# Altium footprint library Amin-Library.PcbLib: 601 footprints (part 13 of 38)
Each footprint in its own frame and in the unit in brackets; x right, y up, seen from the top. Pads: shape width x height; smd on the part's side, far side on the other; paste and mask are expansions set on the pad; w line width, h text height; cw(c..) or ccw(c..) is an arc to the next point about the centre after c.
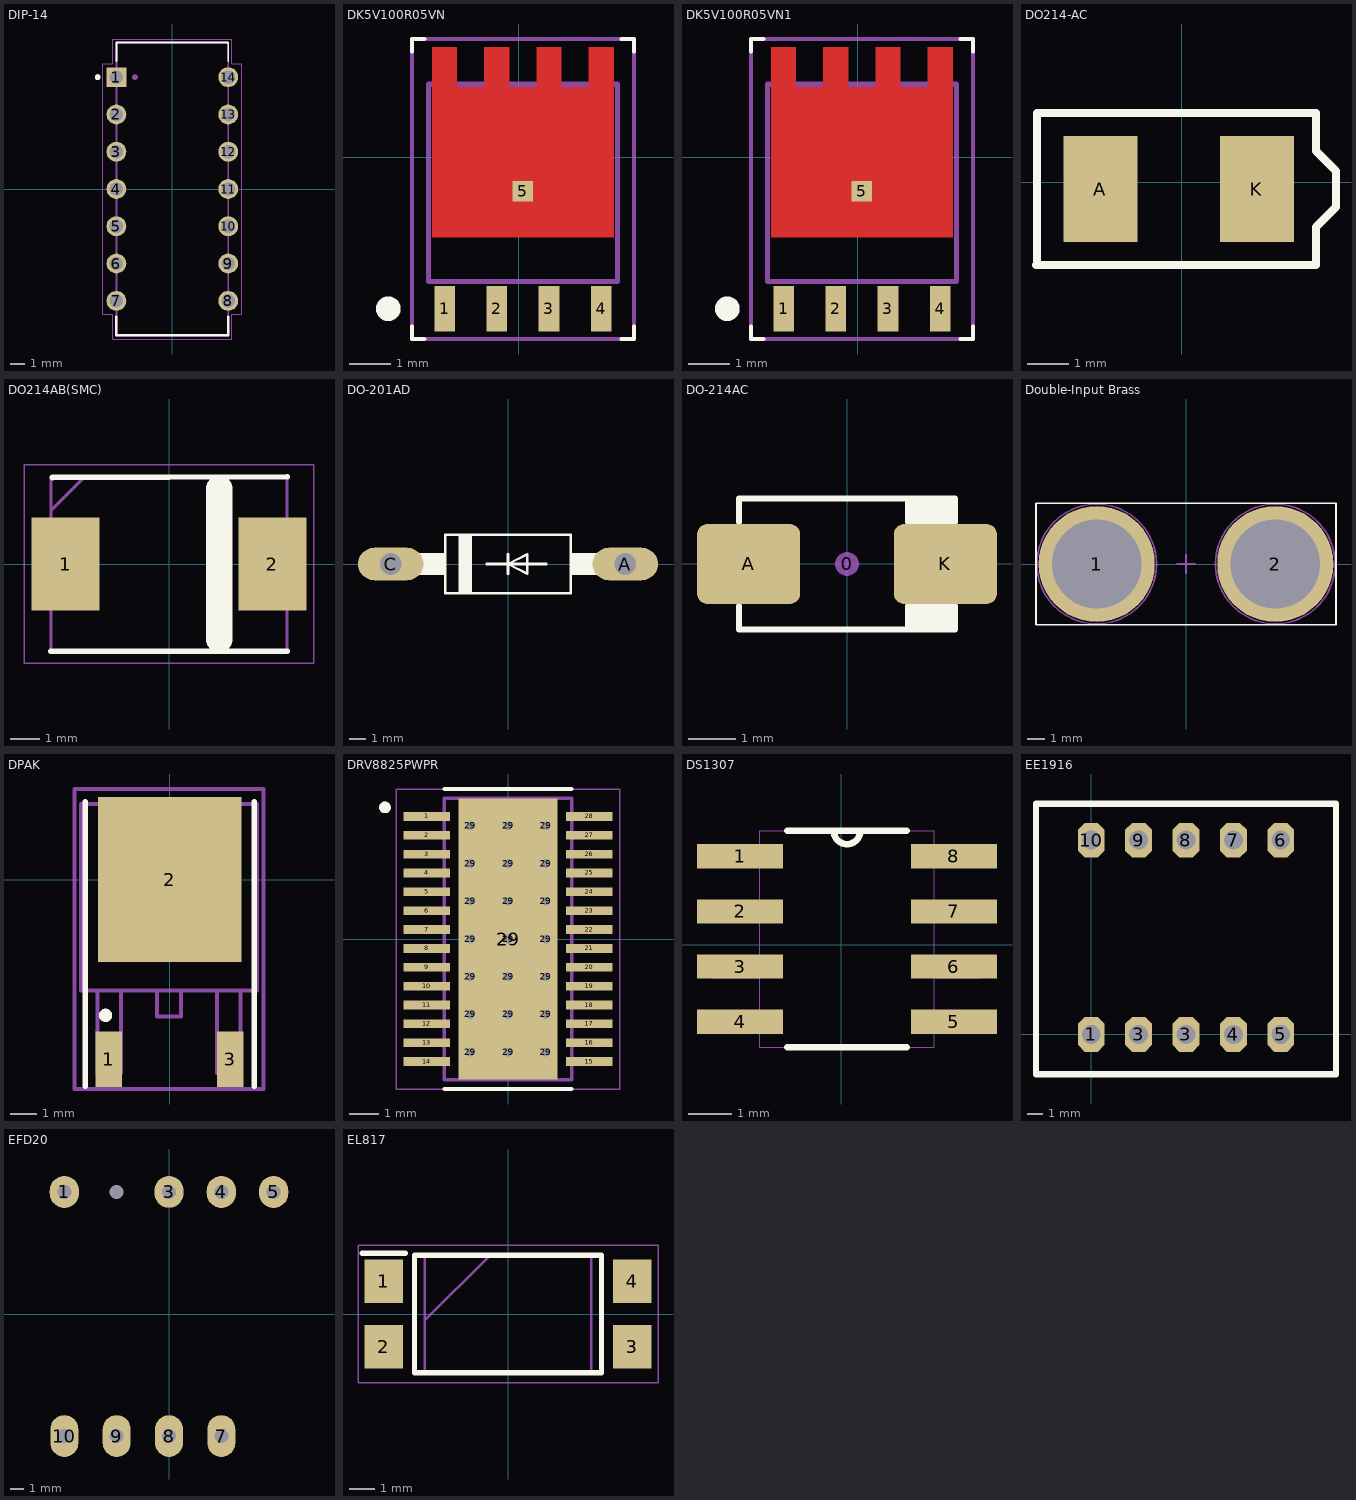
[diagram p12: the footprints below, top view; thin cyan lines are the x and y axes]

## DIP-14 [mm]
pads (14):
  rect 1.35x1.35 hole 0.9: 1(-3.81,7.62)
  round 1.35 hole 0.9: 2(-3.81,5.08) 3(-3.81,2.54) 4(-3.81,0) 5(-3.81,-2.54) 6(-3.81,-5.08) 7(-3.81,-7.62) 8(3.81,-7.62) 9(3.81,-5.08) 10(3.81,-2.54) 11(3.81,0) 12(3.81,2.54) 13(3.81,5.08) 14(3.81,7.62)
Top Overlay:
  circle w0.2: c-5.08,7.62 r0.1
  lines w0.127: -3.81,8.7 -3.81,9.97 3.81,9.97 3.81,8.7
  lines w0.152: -3.81,-8.7 -3.81,-9.97 3.81,-9.97 3.81,-8.7
Mechanical 13:
  circle w0.2: c-2.54,7.62 r0.1
  lines w0.127: -3.81,-9.97 -3.81,9.97 3.81,9.97 3.81,-9.97 -3.81,-9.97
Mechanical 15:
  lines w0.05: -4.735,-8.545 -4.735,8.545 -4.06,8.545 -4.06,10.22 4.06,10.22 4.06,8.545 4.735,8.545 4.735,-8.545 4.06,-8.545 4.06,-10.22 -4.06,-10.22 -4.06,-8.545 -4.735,-8.545
3D body "DIP-14.STEP": height 5.08, standoff -3.3, extent -4.064,-9.652 4.13,9.652

## DK5V100R05VN [mm] "DFN5*6"
height 22
pads (5):
  rect 0.5x1.1 smd paste-1: 1(-1.805,-3.688) 2(-0.535,-3.688) 3(0.735,-3.688) 4(2.005,-3.688)
  rect 0.5x0.5 smd paste-1 mask+0: 5(0.1,-0.825)
Top Layer:
  region: -1.505,2.675 -1.505,1.7 -0.835,1.7 -0.835,2.675 -0.235,2.675 -0.235,1.7 0.435,1.7 0.435,2.675 1.035,2.675 1.035,1.7 1.705,1.7 1.705,2.675 2.305,2.675 2.305,-1.955 -2.105,-1.955 -2.105,2.675
Top Overlay:
  circle w0.3: c-3.175,-3.688 r0.15
  lines w0.1: -2.6,-4.125 -2.6,-4.425 -2.3,-4.425 ; -2.6,2.575 -2.6,2.875 -2.3,2.875 ; 2.5,-4.425 2.8,-4.425 2.8,-4.125 ; 2.5,2.875 2.8,2.875 2.8,2.575
Top Paste:
  region: -0.335,-3.276 -0.335,-4.1 -0.735,-4.1 -0.735,-3.276
  region: -1.605,-3.276 -1.605,-4.1 -2.005,-4.1 -2.005,-3.276
  region: 0.935,-3.276 0.935,-4.1 0.535,-4.1 0.535,-3.276
  region: 2.205,-3.276 2.205,-4.1 1.805,-4.1 1.805,-3.276
  region: -0.285,2.45 -0.285,1.7 -0.785,1.7 -0.785,2.45
  region: -1.555,2.45 -1.555,1.7 -2.055,1.7 -2.055,2.45
  region: 0.985,2.45 0.985,1.7 0.485,1.7 0.485,2.45
  region: 2.255,2.45 2.255,1.7 1.755,1.7 1.755,2.45
  region: 0,-0.2 0,-1.7 -1.5,-1.7 -1.5,-0.2
  region: 0,1.5 0,0 -1.5,0 -1.5,1.5
  region: 1.7,-0.2 1.7,-1.7 0.2,-1.7 0.2,-0.2
  region: 1.7,1.5 1.7,0 0.2,0 0.2,1.5
Top Solder:
  region: -1.405,2.775 -1.405,1.8 -0.935,1.8 -0.935,2.775 -0.135,2.775 -0.135,1.8 0.335,1.8 0.335,2.775 1.135,2.775 1.135,1.8 1.605,1.8 1.605,2.775 2.405,2.775 2.405,-2.055 -2.205,-2.055 -2.205,2.775
Mechanical 13:
  lines w0.127: -2.2,-3.025 2.4,-3.025 2.4,1.775 -2.2,1.775 -2.2,-3.025
Mechanical 15:
  lines w0.1: -0.4,-0.825 0.6,-0.825 ; 0.1,-1.325 0.1,-0.325 ; -2.6,-4.425 -2.6,2.875 2.8,2.875 2.8,2.475 2.8,-4.425 2.4,-4.425 -2.6,-4.425
3D body "BSC0901NSI.STEP": height 1.1, standoff 0, extent -2.475,-3.9 2.675,2.25

## DK5V100R05VN1 [mm] "DFN5*6"
height 22
pads (5):
  rect 0.5x1.1 smd paste-1: 1(-1.805,-3.688) 2(-0.535,-3.688) 3(0.735,-3.688) 4(2.005,-3.688)
  rect 0.5x0.5 smd paste-1 mask+0: 5(0.1,-0.825)
Top Layer:
  region: -1.505,2.675 -1.505,1.7 -0.835,1.7 -0.835,2.675 -0.235,2.675 -0.235,1.7 0.435,1.7 0.435,2.675 1.035,2.675 1.035,1.7 1.705,1.7 1.705,2.675 2.305,2.675 2.305,-1.955 -2.105,-1.955 -2.105,2.675
Top Overlay:
  circle w0.3: c-3.175,-3.688 r0.15
  lines w0.1: -2.6,-4.125 -2.6,-4.425 -2.3,-4.425 ; -2.6,2.575 -2.6,2.875 -2.3,2.875 ; 2.5,-4.425 2.8,-4.425 2.8,-4.125 ; 2.5,2.875 2.8,2.875 2.8,2.575
Top Paste:
  region: -0.335,-3.276 -0.335,-4.1 -0.735,-4.1 -0.735,-3.276
  region: -1.605,-3.276 -1.605,-4.1 -2.005,-4.1 -2.005,-3.276
  region: 0.935,-3.276 0.935,-4.1 0.535,-4.1 0.535,-3.276
  region: 2.205,-3.276 2.205,-4.1 1.805,-4.1 1.805,-3.276
  region: -0.285,2.45 -0.285,1.7 -0.785,1.7 -0.785,2.45
  region: -1.555,2.45 -1.555,1.7 -2.055,1.7 -2.055,2.45
  region: 0.985,2.45 0.985,1.7 0.485,1.7 0.485,2.45
  region: 2.255,2.45 2.255,1.7 1.755,1.7 1.755,2.45
  region: 0,-0.2 0,-1.7 -1.5,-1.7 -1.5,-0.2
  region: 0,1.5 0,0 -1.5,0 -1.5,1.5
  region: 1.7,-0.2 1.7,-1.7 0.2,-1.7 0.2,-0.2
  region: 1.7,1.5 1.7,0 0.2,0 0.2,1.5
Top Solder:
  region: -1.405,2.775 -1.405,1.8 -0.935,1.8 -0.935,2.775 -0.135,2.775 -0.135,1.8 0.335,1.8 0.335,2.775 1.135,2.775 1.135,1.8 1.605,1.8 1.605,2.775 2.405,2.775 2.405,-2.055 -2.205,-2.055 -2.205,2.775
Mechanical 13:
  lines w0.127: -2.2,-3.025 2.4,-3.025 2.4,1.775 -2.2,1.775 -2.2,-3.025
Mechanical 15:
  lines w0.1: -0.4,-0.825 0.6,-0.825 ; 0.1,-1.325 0.1,-0.325 ; -2.6,-4.425 -2.6,2.875 2.8,2.875 2.8,2.475 2.8,-4.425 2.4,-4.425 -2.6,-4.425
3D body "BSC0901NSI.STEP": height 1.1, standoff 0, extent -2.475,-3.9 2.675,2.25

## DO214-AC [mm]
pads (2):
  rect 1.78x2.54 smd: A(-1.956,-0.165) K(1.804,-0.165)
Top Overlay:
  lines w0.2: -3.505,-1.994 3.226,-1.994 3.226,-1.079 3.709,-0.597 3.709,0.267 3.226,0.749 3.226,1.664 -3.48,1.664 -3.48,-1.994

## DO214AB(SMC) [mm]
pads (2):
  rect 2.3x3.15 smd: 1(-3.5,0) 2(3.5,0)
Top Overlay:
  lines w0.2: -4,-2.952 4,-2.952 ; -3.937,2.921 4,2.952
  lines w0.9: 1.7,-2.54 1.7,2.54
Mechanical 15:
  lines w0.1: -4,1.802 -2.85,2.952 ; -4,-2.952 -4,2.952 4,2.952 4,-2.952 -4,-2.952
Mechanical 20:
  lines w0.05: -4.9,-3.36 -4.9,3.36 4.9,3.36 4.9,-3.36 -4.9,-3.36
3D body "DO214AB(SMC).stp": height 2.9, standoff 0, extent -4,-2.953 4,2.952

## DO-201AD [mm]
pads (2):
  oval 3.9x1.95 hole 1.3: A(6.985,0) C(-6.985,0)
Top Overlay:
  region: 3.75,0.635 6,0.635 6,-0.635 3.75,-0.635
  region: -6,0.635 -3.75,0.635 -3.75,-0.635 -6,-0.635
  region: -2.921,1.75 -2.159,1.75 -2.159,-1.75 -2.921,-1.75
  lines w0.152: -1.27,0 0,0 ; 0,-0.584 0,0 ; 0,0.584 0,0 ; 2.286,0 0,0 ; 0,0 1.143,-0.584 1.143,0.584 0,0 ; -3.75,-1.75 3.75,-1.75 3.75,1.75 -3.75,1.75 -3.75,-1.75
3D body "DO-201AD.stp": height 5.65, standoff -3.66, extent -7.73,-2.65 7.73,2.65

## DO-214AC [mm] "JEDEC DO214 variation AC. SMA"
height 2.5
pads (3):
  round 0.508 on Mech15: 0(0,0)
  rrect25% 2.2x1.7 smd: A(-2.1,0) K(2.1,0)
Top Overlay:
  rectangle: 1.3,0.9 2.3,1.4
  rectangle: 1.3,-1.4 2.3,-0.9
  lines w0.127: -2.3,-0.9 -2.3,-1.4 2.3,-1.4 2.3,-0.9 1.3,-0.9 1.3,-1.4 ; -2.3,0.9 -2.3,1.4 2.3,1.4 2.3,0.9 1.3,0.9 ; 1.3,0.911 1.3,1.4
3D body "SW3dPS-DO-214AC SMA.STEP": height 2.42, standoff 0.02, extent -2.6,-1.3 2.6,1.3

## Double-Input Brass [mm]
height 10.5
pads (2):
  round 6.5 hole 5: 1(-5,0) 2(5,0)
Top Overlay:
  lines w0.1: -8.4,-3.4 8.4,-3.4 8.4,3.4 -8.4,3.4 -8.4,-3.4
Mechanical 1:
  circle w0.1: c5,0 r3.35
  circle w0.1: c-5,0 r3.35
Mechanical 15:
  lines w0.1: -0.5,0 0.5,0 ; 0,-0.5 0,0.5
3D body: height 9, standoff -1, extent -7.54,-2.54 -2.46,2.54
3D body: height 9, standoff -1, extent 2.46,-2.54 7.54,2.54

## DPAK [mm]
height 9.45
pads (3):
  rect 1x2.1 smd: 1(-2.285,-6.75) 3(2.285,-6.75)
  rect 5.4x6.2 smd paste-3: 2(0,0)
Top Overlay:
  circle w0.25: c-2.41,-5.099 r0.125
  lines w0.2: -3.174,-7.766 -3.174,2.934 ; 3.176,-7.766 3.176,2.934
Top Paste:
  rectangle: 0.5,0.5 2.5,3
  rectangle: -2.5,0.5 -0.5,3
  rectangle: 0.5,-3 2.5,-0.5
  rectangle: -2.5,-3 -0.5,-0.5
Mechanical 4:
  lines w0.152: -3.326,-4.159 -3.326,2.851 ; -3.326,-4.159 3.278,-4.159 ; -3.326,-4.159 -3.326,2.851 ; -3.326,-4.159 3.278,-4.159 ; -3.326,2.851 3.278,2.851 ; -3.326,2.851 3.278,2.851 ; -2.717,-7.258 -1.828,-7.258 ; -2.717,-7.258 -2.717,-4.159 ; -2.717,-7.258 -1.828,-7.258 ; -2.717,-7.258 -2.717,-4.159 ; -2.717,-4.159 -1.828,-4.159 ; -2.717,-4.159 -1.828,-4.159 ; -1.828,-7.258 -1.828,-4.159 ; -1.828,-7.258 -1.828,-4.159 ; -0.482,-5.15 0.433,-5.15 ; -0.482,-5.15 -0.482,-4.159 -0.482,-5.15 ; -0.482,-5.15 0.433,-5.15 ; 0.433,-5.15 0.433,-4.159 0.433,-5.15 ; 1.779,-7.258 2.668,-7.258 ; 1.779,-7.258 1.779,-4.159 ; 1.779,-7.258 2.668,-7.258 ; 1.779,-7.258 1.779,-4.159 ; 1.779,-4.159 2.668,-4.159 ; 1.779,-4.159 2.668,-4.159 ; 2.668,-7.258 2.668,-4.159 ; 2.668,-7.258 2.668,-4.159 ; 3.278,-4.159 3.278,2.851 ; 3.278,-4.159 3.278,2.851
Mechanical 16:
  lines w0.152: -3.58,-7.868 -3.58,3.41 3.532,3.41 3.532,-7.868 -3.58,-7.868
3D body "User Library-Generic DPAK 3 lead.step": height 2.4, standoff 0, extent -3.391,-6.854 3.343,3.246

## Drop_Bottom [mm]
3D body "down 5.SLDPRT": height 21.01, standoff 6.01, extent -95.206,-97.761 114.764,162.239

## Drop_Top [mm]
3D body "28.SLDPRT": height 36.51, standoff 0.01, extent 17.272,-2.746 227.272,257.254

## DRV8825PWPR [mm] "HTSSOP-28"
pads (50):
  rect 1.6x0.3 smd paste-2 mask+0: 1(-2.8,4.225) 2(-2.8,3.575) 3(-2.8,2.925) 4(-2.8,2.275) 5(-2.8,1.625) 6(-2.8,0.975) 7(-2.8,0.325) 8(-2.8,-0.325) 9(-2.8,-0.975) 10(-2.8,-1.625) 11(-2.8,-2.275) 12(-2.8,-2.925) 13(-2.8,-3.575) 14(-2.8,-4.225) 15(2.8,-4.225) 16(2.8,-3.575) 17(2.8,-2.925) 18(2.8,-2.275) 19(2.8,-1.625) 20(2.8,-0.975) 21(2.8,-0.325) 22(2.8,0.325) 23(2.8,0.975) 24(2.8,1.625) 25(2.8,2.275) 26(2.8,2.925) 27(2.8,3.575) 28(2.8,4.225)
  round 0.5 hole 0.3 mask+0: 29(-1.3,-3.9) 29(-1.3,-2.6) 29(-1.3,-1.3) 29(-1.3,0) 29(-1.3,1.3) 29(-1.3,2.6) 29(-1.3,3.9) 29(0,-3.9) 29(0,-2.6) 29(0,-1.3) 29(0,0) 29(0,1.3) 29(0,2.6) 29(0,3.9) 29(1.3,-3.9) 29(1.3,-2.6) 29(1.3,-1.3) 29(1.3,0) 29(1.3,1.3) 29(1.3,2.6) 29(1.3,3.9)
  rect 3.4x9.7 smd paste-6 mask+0: 29(0,0)
Top Overlay:
  circle w0.2: c-4.24,4.535 r0.1
  lines w0.127: -2.2,-5.17 2.2,-5.17 ; -2.2,5.17 2.2,5.17
Top Paste:
  region: 3.575,-4.35 2.025,-4.35 2.025,-4.1 3.575,-4.1
  region: 3.575,-3.7 2.025,-3.7 2.025,-3.45 3.575,-3.45
  region: 3.575,-3.05 2.025,-3.05 2.025,-2.8 3.575,-2.8
  region: 3.575,-2.4 2.025,-2.4 2.025,-2.15 3.575,-2.15
  region: 3.575,-1.75 2.025,-1.75 2.025,-1.5 3.575,-1.5
  region: 3.575,-1.1 2.025,-1.1 2.025,-0.85 3.575,-0.85
  region: 3.575,-0.45 2.025,-0.45 2.025,-0.2 3.575,-0.2
  region: -2.025,-4.35 -3.575,-4.35 -3.575,-4.1 -2.025,-4.1
  region: -2.025,-3.7 -3.575,-3.7 -3.575,-3.45 -2.025,-3.45
  region: -2.025,-3.05 -3.575,-3.05 -3.575,-2.8 -2.025,-2.8
  region: -2.025,-2.4 -3.575,-2.4 -3.575,-2.15 -2.025,-2.15
  region: -2.025,-1.75 -3.575,-1.75 -3.575,-1.5 -2.025,-1.5
  region: -2.025,-1.1 -3.575,-1.1 -3.575,-0.85 -2.025,-0.85
  region: -2.025,-0.45 -3.575,-0.45 -3.575,-0.2 -2.025,-0.2
  region: 3.575,0.2 2.025,0.2 2.025,0.45 3.575,0.45
  region: -2.025,0.2 -3.575,0.2 -3.575,0.45 -2.025,0.45
  region: 3.575,0.85 2.025,0.85 2.025,1.1 3.575,1.1
  region: -2.025,0.85 -3.575,0.85 -3.575,1.1 -2.025,1.1
  region: 3.575,1.5 2.025,1.5 2.025,1.75 3.575,1.75
  region: -2.025,1.5 -3.575,1.5 -3.575,1.75 -2.025,1.75
  region: 3.575,2.15 2.025,2.15 2.025,2.4 3.575,2.4
  region: -2.025,2.15 -3.575,2.15 -3.575,2.4 -2.025,2.4
  region: 3.575,2.8 2.025,2.8 2.025,3.05 3.575,3.05
  region: -2.025,2.8 -3.575,2.8 -3.575,3.05 -2.025,3.05
  region: 3.575,3.45 2.025,3.45 2.025,3.7 3.575,3.7
  region: -2.025,3.45 -3.575,3.45 -3.575,3.7 -2.025,3.7
  region: 3.575,4.1 2.025,4.1 2.025,4.35 3.575,4.35
  region: -2.025,4.1 -3.575,4.1 -3.575,4.35 -2.025,4.35
  region: 1.2,-3.23 -1.2,-3.23 -1.2,3.23 1.2,3.23
Top Solder:
  region: 3.67,-4.445 1.93,-4.445 1.93,-4.005 3.67,-4.005
  region: 3.67,-3.795 1.93,-3.795 1.93,-3.355 3.67,-3.355
  region: 3.67,-3.145 1.93,-3.145 1.93,-2.705 3.67,-2.705
  region: 3.67,-2.495 1.93,-2.495 1.93,-2.055 3.67,-2.055
  region: 3.67,-1.845 1.93,-1.845 1.93,-1.405 3.67,-1.405
  region: 3.67,-1.195 1.93,-1.195 1.93,-0.755 3.67,-0.755
  region: 3.67,-0.545 1.93,-0.545 1.93,-0.105 3.67,-0.105
  region: -1.93,-4.445 -3.67,-4.445 -3.67,-4.005 -1.93,-4.005
  region: -1.93,-3.795 -3.67,-3.795 -3.67,-3.355 -1.93,-3.355
  region: -1.93,-3.145 -3.67,-3.145 -3.67,-2.705 -1.93,-2.705
  region: -1.93,-2.495 -3.67,-2.495 -3.67,-2.055 -1.93,-2.055
  region: -1.93,-1.845 -3.67,-1.845 -3.67,-1.405 -1.93,-1.405
  region: -1.93,-1.195 -3.67,-1.195 -3.67,-0.755 -1.93,-0.755
  region: -1.93,-0.545 -3.67,-0.545 -3.67,-0.105 -1.93,-0.105
  region: 3.67,0.105 1.93,0.105 1.93,0.545 3.67,0.545
  region: -1.93,0.105 -3.67,0.105 -3.67,0.545 -1.93,0.545
  region: 3.67,0.755 1.93,0.755 1.93,1.195 3.67,1.195
  region: -1.93,0.755 -3.67,0.755 -3.67,1.195 -1.93,1.195
  region: 3.67,1.405 1.93,1.405 1.93,1.845 3.67,1.845
  region: -1.93,1.405 -3.67,1.405 -3.67,1.845 -1.93,1.845
  region: 3.67,2.055 1.93,2.055 1.93,2.495 3.67,2.495
  region: -1.93,2.055 -3.67,2.055 -3.67,2.495 -1.93,2.495
  region: 3.67,2.705 1.93,2.705 1.93,3.145 3.67,3.145
  region: -1.93,2.705 -3.67,2.705 -3.67,3.145 -1.93,3.145
  region: 3.67,3.355 1.93,3.355 1.93,3.795 3.67,3.795
  region: -1.93,3.355 -3.67,3.355 -3.67,3.795 -1.93,3.795
  region: 3.67,4.005 1.93,4.005 1.93,4.445 3.67,4.445
  region: -1.93,4.005 -3.67,4.005 -3.67,4.445 -1.93,4.445
  region: 1.2,-3.23 -1.2,-3.23 -1.2,3.23 1.2,3.23
Mechanical 13:
  circle w0.2: c-4.24,4.535 r0.1
  lines w0.127: -2.2,-4.85 -2.2,4.85 2.2,4.85 2.2,-4.85 -2.2,-4.85
Mechanical 15:
  lines w0.05: -3.85,-5.17 -3.85,5.17 3.85,5.17 3.85,-5.17 -3.85,-5.17
3D body "DRV8825PWPR--3DModel-STEP-56544 (1).STEP": height 1.2, standoff 0, extent -3.2,-4.826 3.2,4.874

## DS1307 [mil]
pads (8):
  rect 78x22 smd: 1(-92,80) 2(-92,30) 3(-92,-20) 4(-92,-70) 5(102,-70) 6(102,-20) 7(102,30) 8(102,80)
Top Overlay:
  lines w6: -49,-93 59,-93 ; -49,103 -7,103 ; 59,103 17,103 ; -7,103 ccw(c5,103) 17,103 ; -7,103 17,103
Mechanical 4:
  lines w0: -117,-80 -74,-80 ; -117,-80 -117,-60 ; -117,-80 -74,-80 ; -117,-80 -117,-60 ; -117,-60 -74,-60 ; -117,-60 -74,-60 ; -117,-30 -74,-30 ; -117,-30 -117,-10 ; -117,-30 -74,-30 ; -117,-30 -117,-10 ; -117,-10 -74,-10 ; -117,-10 -74,-10 ; -117,20 -74,20 ; -117,20 -117,40 ; -117,20 -74,20 ; -117,20 -117,40 ; -117,40 -74,40 ; -117,40 -74,40 ; -117,70 -74,70 ; -117,70 -117,90 ; -117,70 -74,70 ; -117,70 -117,90 ; -117,90 -74,90 ; -117,90 -74,90 ; -74,-93 -74,103 ; -74,-93 84,-93 ; -74,-93 -74,103 ; -74,-93 84,-93 ; -74,-80 -74,-60 ; -74,-80 -74,-60 ; -74,-30 -74,-10 ; -74,-30 -74,-10 ; -74,20 -74,40 ; -74,20 -74,40 ; -74,70 -74,90 ; -74,70 -74,90 ; -74,103 -7,103 ; -74,103 -7,103 ; -7,103 ccw(c5,103) 17,103 ; -7,103 ccw(c5,103) 17,103 ; -7,103 17,103 ; -7,103 17,103 ; 17,103 84,103 ; 17,103 84,103 ; 84,-93 84,103 ; 84,-93 84,103 ; 84,-80 127,-80 ; 84,-80 84,-60 ; 84,-80 127,-80 ; 84,-80 84,-60 ; 84,-60 127,-60 ; 84,-60 127,-60 ; 84,-30 127,-30 ; 84,-30 84,-10 ; 84,-30 127,-30 ; 84,-30 84,-10 ; 84,-10 127,-10 ; 84,-10 127,-10 ; 84,20 127,20 ; 84,20 84,40 ; 84,20 127,20 ; 84,20 84,40 ; 84,40 127,40 ; 84,40 127,40 ; 84,70 127,70 ; 84,70 84,90 ; 84,70 127,70 ; 84,70 84,90 ; 84,90 127,90 ; 84,90 127,90 ; 127,-80 127,-60 ; 127,-80 127,-60 ; 127,-30 127,-10 ; 127,-30 127,-10 ; 127,20 127,40 ; 127,20 127,40 ; 127,70 127,90 ; 127,70 127,90
3D body "MAX1562ESA+--3DModel-STEP-56544.STEP": height 59.56, standoff -9.34, extent -113.1,-91.46 123.11,101.46

## EE1916 [mm]
height 1.91
pads (10):
  oct 1.7x2.2 hole 1.2: 1(0,0) 3(3,0) 3(6,0) 4(9,0) 5(12,0) 6(12,12.3) 7(9,12.3) 8(6,12.3) 9(3,12.3) 10(0,12.3)
Top Overlay:
  lines w0.4: -3.5,-2.514 -3.5,14.6 15.5,14.6 15.5,-2.514 -3.5,-2.514
3D body "User Library-IND-EE19-7680651.step": height 14.5, standoff -5.55, extent -4.15,-2.3 16.15,14.5

## EFD20 [mm]
height 1.91
pads (9):
  oval 2.1x2.3 / inner round 0 / far side round 0 hole 1: 1(-7.5,8.75) 4(3.75,8.75)
  round 0 hole 1: 2(-3.75,8.75)
  oval 2.083x2.286 / inner round 0 / far side round 0 hole 1: 3(0,8.75)
  oval 2.1x2.3 hole 1: 5(7.5,8.75)
  oval 2x3 hole 1: 7(3.75,-8.75) 8(0,-8.75) 9(-3.75,-8.75) 10(-7.5,-8.75)
Bottom Overlay:
  lines w0.1: -10.75,-7.694 10.75,-7.694 ; -10.75,7.694 10.75,7.694 ; -7.62,-7.694 -7.62,7.694 ; 7.62,-7.694 7.62,7.694 ; -10.75,-10.75 -10.75,10.75 10.75,10.75 10.75,-10.75 -10.75,-10.75

## EL817 [mm]
pads (4):
  rect 1.5x1.7 smd: 1(-4.85,1.27) 2(-4.85,-1.27) 3(4.85,-1.27) 4(4.85,1.27)
Top Overlay:
  lines w0.2: -5.7,2.37 -4,2.37 ; -3.65,-2.29 3.65,-2.29 3.65,2.29 -3.65,2.29 -3.65,-2.29
Mechanical 13:
  lines w0.1: -3.25,-0.25 -0.71,2.29 ; -3.25,-2.29 3.25,-2.29 3.25,2.29 -3.25,2.29 -3.25,-2.29
Mechanical 15:
  lines w0.05: -5.85,-2.69 5.85,-2.69 5.85,2.69 -5.85,2.69 -5.85,-2.69
3D body "EL817_S__A__TA_-G.stp": height 5, standoff 0, extent -5.15,-2.29 5.15,2.29